# EAGLE library part AK5538VN (library AK5538VN)
ADC, Audio 32 b 768k DSD, PCM 64-QFN (9x9) Source: Datasheet <https://www.akm.com/content/dam/documents/products/audio/audio-adc/ak5538vn/ak5538vn-en-datasheet.pdf>
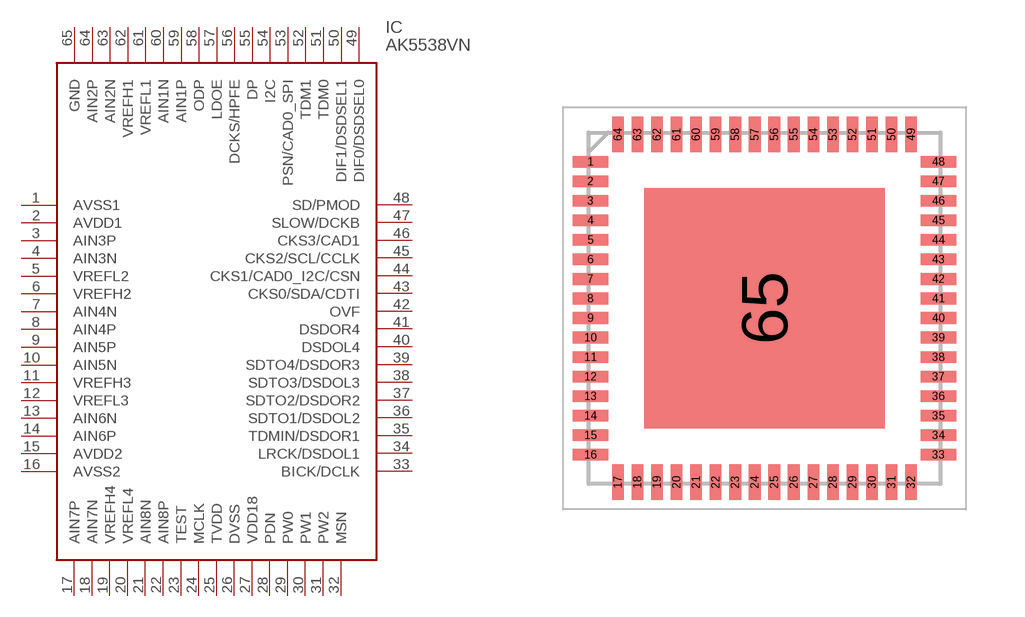
[diagram p0: symbol with the pads of QFN50P900X900X100-65N; footprint QFN50P900X900X100-65N]

Designator prefix IC

## AK5538VN (Description: ADC, Audio 32 b 768k DSD, PCM 64-QFN (9x9); Height: 1mm; Manufacturer_Name: Asahi Kasei Microdevices; Manufacturer_Part_Number: AK5538VN; Mouser_Part_Number: 412-AK5538VN; Mouser_Price-Stock: https://www.mouser.co.uk/ProductDetail/Asahi-Kasei-Microdevices/AK5538VN?qs=vvQtp7zwQdPIrFHV6bIVJQ%3D%3D)  [QFN50P900X900X100-65N]
1  AVSS1
2  AVDD1
3  AIN3P
4  AIN3N
5  VREFL2
6  VREFH2
7  AIN4N
8  AIN4P
9  AIN5P
10  AIN5N
11  VREFH3
12  VREFL3
13  AIN6N
14  AIN6P
15  AVDD2
16  AVSS2
17  AIN7P
18  AIN7N
19  VREFH4
20  VREFL4
21  AIN8N
22  AIN8P
23  TEST
24  MCLK
25  TVDD
26  DVSS
27  VDD18
28  PDN
29  PW0
30  PW1
31  PW2
32  MSN
33  BICK/DCLK
34  LRCK/DSDOL1
35  TDMIN/DSDOR1
36  SDTO1/DSDOL2
37  SDTO2/DSDOR2
38  SDTO3/DSDOL3
39  SDTO4/DSDOR3
40  DSDOL4
41  DSDOR4
42  OVF
43  CKS0/SDA/CDTI
44  CKS1/CAD0_I2C/CSN
45  CKS2/SCL/CCLK
46  CKS3/CAD1
47  SLOW/DCKB
48  SD/PMOD
49  DIF0/DSDSEL0
50  DIF1/DSDSEL1
51  TDM0
52  TDM1
53  PSN/CAD0_SPI
54  I2C
55  DP
56  DCKS/HPFE
57  LDOE
58  ODP
59  AIN1P
60  AIN1N
61  VREFL1
62  VREFH1
63  AIN2N
64  AIN2P
65  GND

## Footprint QFN50P900X900X100-65N (pad centres in mm)
64-pin QFN
smd 0.9 x 0.3: 1 -4.45,3.75; 2 -4.45,3.25; 3 -4.45,2.75; 4 -4.45,2.25; 5 -4.45,1.75; 6 -4.45,1.25; 7 -4.45,0.75; 8 -4.45,0.25; 9 -4.45,-0.25; 10 -4.45,-0.75; 11 -4.45,-1.25; 12 -4.45,-1.75; 13 -4.45,-2.25; 14 -4.45,-2.75; 15 -4.45,-3.25; 16 -4.45,-3.75; 33 4.45,-3.75; 34 4.45,-3.25; 35 4.45,-2.75; 36 4.45,-2.25; 37 4.45,-1.75; 38 4.45,-1.25; 39 4.45,-0.75; 40 4.45,-0.25; 41 4.45,0.25; 42 4.45,0.75; 43 4.45,1.25; 44 4.45,1.75; 45 4.45,2.25; 46 4.45,2.75; 47 4.45,3.25; 48 4.45,3.75
smd 0.3 x 0.9: 17 -3.75,-4.45; 18 -3.25,-4.45; 19 -2.75,-4.45; 20 -2.25,-4.45; 21 -1.75,-4.45; 22 -1.25,-4.45; 23 -0.75,-4.45; 24 -0.25,-4.45; 25 0.25,-4.45; 26 0.75,-4.45; 27 1.25,-4.45; 28 1.75,-4.45; 29 2.25,-4.45; 30 2.75,-4.45; 31 3.25,-4.45; 32 3.75,-4.45; 49 3.75,4.45; 50 3.25,4.45; 51 2.75,4.45; 52 2.25,4.45; 53 1.75,4.45; 54 1.25,4.45; 55 0.75,4.45; 56 0.25,4.45; 57 -0.25,4.45; 58 -0.75,4.45; 59 -1.25,4.45; 60 -1.75,4.45; 61 -2.25,4.45; 62 -2.75,4.45; 63 -3.25,4.45; 64 -3.75,4.45
smd 6.15 x 6.15: 65 0,0